# Altium schematic symbol library FXL0420-XRX-M.SchLib: 1 symbol
Pins are listed as number, name and electrical type; pins without a type are passive.

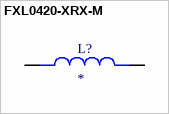
[diagram p0: symbol FXL0420-XRX-M]

## FXL0420-XRX-M
designator L?
footprint FXL0420-XRX-M
pins: 1, 2